# Altium footprint library ACB_PcbLib.PcbLib: 40 footprints (part 2 of 3)
Each footprint in its own frame and in the unit in brackets; x right, y up, seen from the top. Pads: shape width x height; smd on the part's side, far side on the other; paste and mask are expansions set on the pad; w line width, h text height; cw(c..) or ccw(c..) is an arc to the next point about the centre after c.
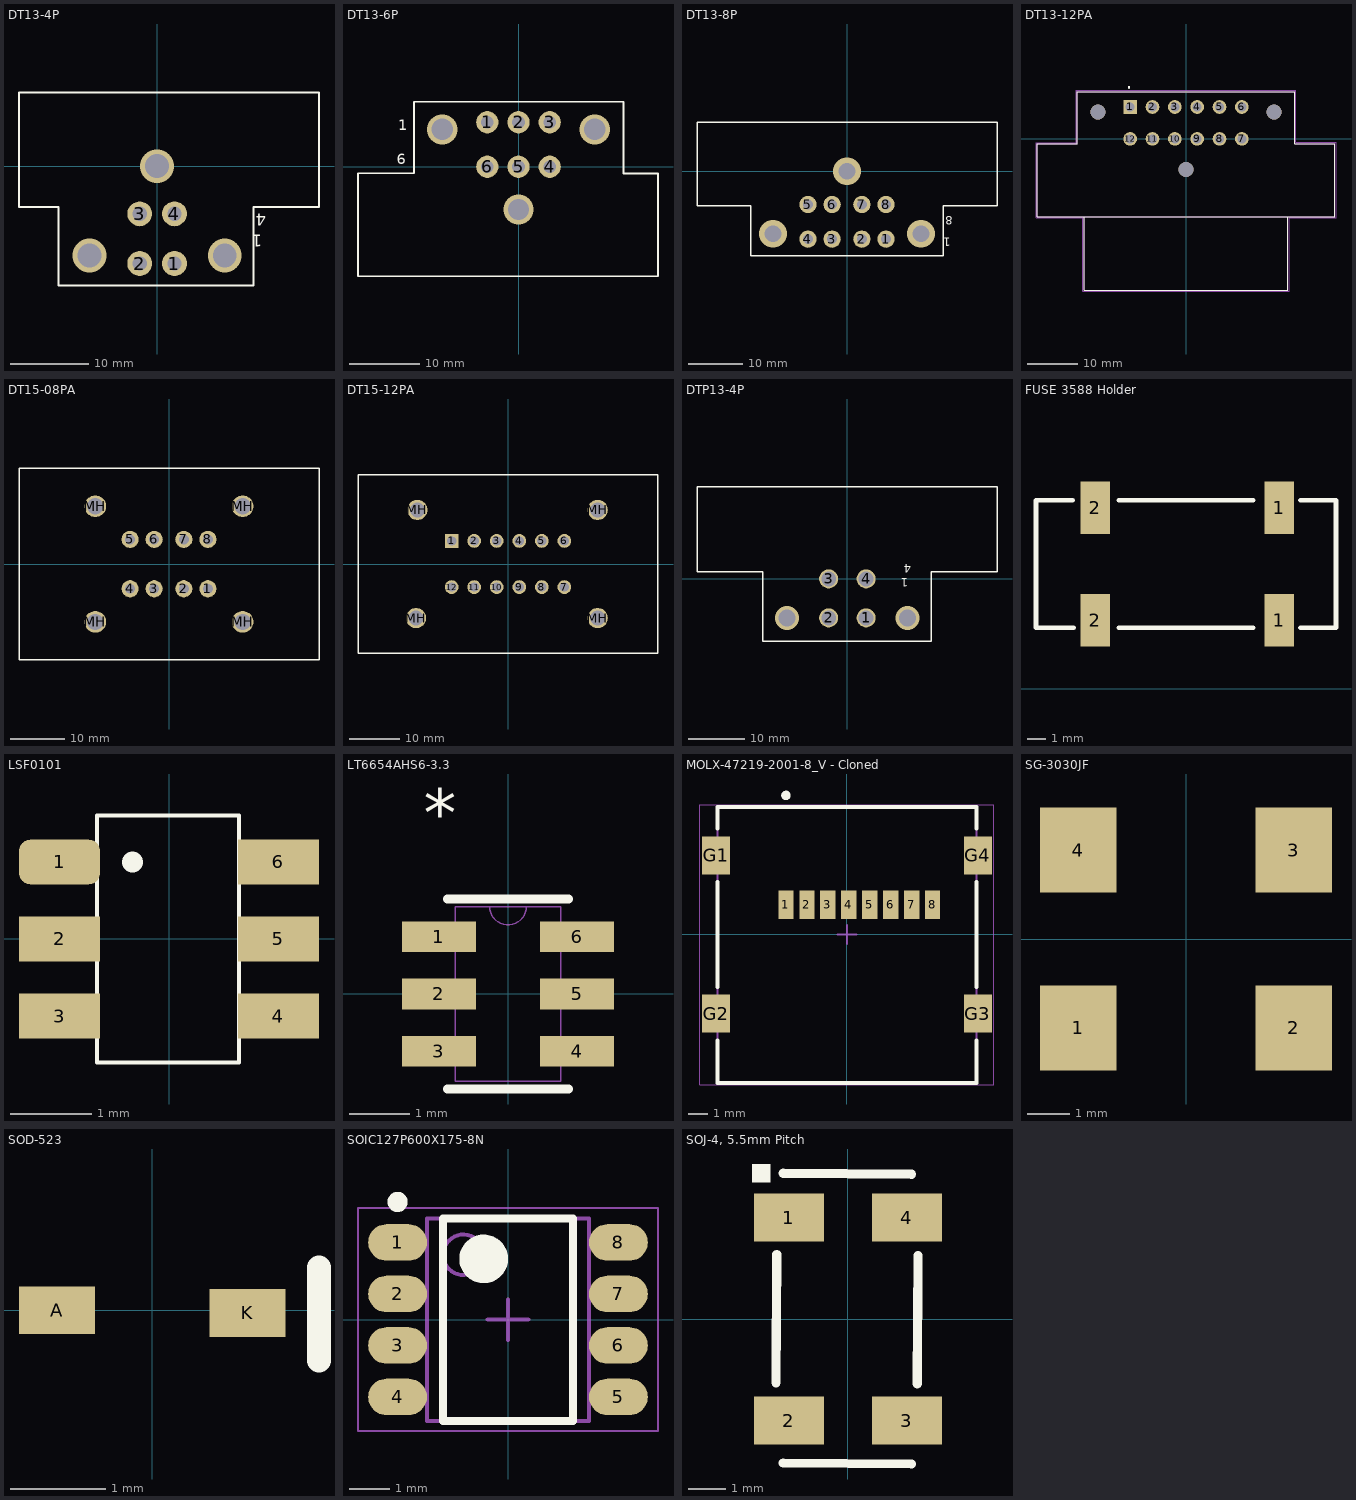
[diagram p1: the footprints below, top view; thin cyan lines are the x and y axes]

## DT13-4P [mil]
pads (4):
  round 125 hole 72: 1(87.5,-490) 2(-87.5,-490) 3(-87.5,-240)
  round 125 hole 72.01: 4(87.5,-240)
via 0,0 diameter 170 hole 120
via -340.5,-450 diameter 170 hole 120
via 340.5,-450 diameter 170 hole 120
Top Overlay:
  lines w10: -500,-205 -695,-205 -695,370 815,370 815,-205 490,-205 ; -495,-205 -495,-600 485,-600 485,-205
  text "4" at 550,-240 h60
  text "1" at 530,-345 h60
3D body "DT13-4P.stp": height 1394, standoff -125, extent -700,-607.5 810,947.5

## DT13-6P [mil]
pads (6):
  round 125 hole 72: 1(-175.2,250) 2(0,250) 3(175.2,250) 4(175.2,0) 5(0,0) 6(-175.2,0)
via 0,-240.16 diameter 170 hole 120
via -428.15,209.65 diameter 170 hole 120
via 428.15,209.65 diameter 170 hole 120
Top Overlay:
  lines w10: -901.57,-615.16 783.46,-615.16 783.46,-37.4 589.57,-37.4 589.57,365.16 -586.61,365.16 -586.61,-36.42 -901.57,-36.42 -901.57,-615.16
  text "1" at -674.21,203.74 h60
  text "6" at -685.04,12.8 h60
3D body "c-dt13-6p-99-3d.stp": height 1402.66, standoff -116.34, extent -903.52,-1182.95 781.48,372.05

## DT13-8P [mil]
pads (8):
  round 125 hole 72: 1(282.5,-490) 2(107.5,-490) 3(-107.5,-490) 4(-282.5,-490) 5(-282.5,-240) 7(107.5,-240)
  round 125 hole 72.01: 6(-107.5,-240) 8(282.5,-240)
via 535,-450 diameter 200 hole 120
via -535,-450 diameter 200 hole 120
via 0,0 diameter 200 hole 120
Top Overlay:
  lines w10: -1085,-250 -695,-250 -695,-610 695,-610 695,-250 1085,-250 1085,355 -1085,355 -1085,-250
  text "1" at 750,-480 h60
  text "8" at 765,-325 h60
3D body "c-dt13-08pc-99-3d.stp": height 1394, standoff -125, extent -1090,-602.5 1080,942.5

## DT13-12PA [mm]
pads (15):
  rect 2.715x2.715 hole 1.81: 1(-11.115,6.35)
  round 2.715 hole 1.81: 2(-6.67,6.35) 3(-2.225,6.35) 4(2.225,6.35) 5(6.67,6.35) 6(11.115,6.35) 7(11.115,0) 8(6.67,0) 9(2.225,0) 10(-2.225,0) 11(-6.67,0) 12(-11.115,0)
  round 2.99 hole 2.99 unplated: None(-17.54,5.34) None(0,-6.1) None(17.54,5.34)
Top Overlay:
  circle w0.2: c-11.35,10.25 r0.158
  lines w0.127: -20.28,-15.49 -20.28,-30.1 20.28,-30.1 20.28,-15.49 ; -20.28,-15.49 -29.605,-15.49 -29.605,-1 -21.605,-1 -21.605,9.4 21.605,9.4 21.605,-1 29.605,-1 29.605,-15.49 20.28,-15.49 ; -20.28,-15.49 20.28,-15.49
Mechanical 4:
  lines w0.127: -29.605,-15.49 -29.605,-1 ; -29.605,-15.49 -20.28,-15.49 ; -29.605,-15.49 -29.605,-1 ; -29.605,-15.49 -20.28,-15.49 ; -29.605,-1 -21.605,-1 ; -29.605,-1 -21.605,-1 ; -21.605,-1 -21.605,9.4 ; -21.605,-1 -21.605,9.4 ; -21.605,9.4 21.605,9.4 ; -21.605,9.4 21.605,9.4 ; -20.28,-30.1 20.28,-30.1 ; -20.28,-30.1 -20.28,-15.49 ; -20.28,-30.1 20.28,-30.1 ; -20.28,-30.1 -20.28,-15.49 ; -20.28,-15.49 20.28,-15.49 ; -20.28,-15.49 20.28,-15.49 ; 20.28,-30.1 20.28,-15.49 ; 20.28,-30.1 20.28,-15.49 ; 20.28,-15.49 29.605,-15.49 ; 20.28,-15.49 29.605,-15.49 ; 21.605,-1 29.605,-1 ; 21.605,-1 21.605,9.4 ; 21.605,-1 29.605,-1 ; 21.605,-1 21.605,9.4 ; 29.605,-15.49 29.605,-1 ; 29.605,-15.49 29.605,-1
Mechanical 16:
  lines w0.05: -29.855,-15.74 -29.855,-0.75 -21.85,-0.75 -21.85,9.65 21.85,9.65 21.85,-0.7 29.855,-0.7 29.855,-15.74 20.53,-15.74 20.53,-30.35 -20.53,-30.35 -20.53,-15.74 -29.855,-15.74

## DT15-08PA [mil]
pads (12):
  round 125 hole 72: 1(282.5,-179.5) 2(107.5,-179.5) 3(-107.5,-179.5) 4(-282.5,-179.5) 5(-282.5,179.5) 7(107.5,179.5)
  round 125 hole 72.01: 6(-107.5,179.5) 8(282.5,179.5)
  round 157.48 hole 118.11: MH(-535,-420) MH(-535,420) MH(535,-420) MH(535,420)
Top Overlay:
  lines w10: -1089.57,-695.87 -1089.57,696.85 1087.6,696.85 1089.57,694.88 1089.57,-693.9 1087.6,-695.87 -1089.57,-695.87
  text "." at -1061.02,747.05 h60
3D body "c-dt15-08pa-99-3d.stp": height 1181.1, standoff -125.9, extent -1084.99,-694.98 1085.01,693.02

## DT15-12PA [mm]
pads (16):
  rect 2.715x2.715 hole 1.81: 1(-11.115,4.559)
  round 2.715 hole 1.81: 2(-6.67,4.559) 3(-2.225,4.559) 4(2.225,4.559) 5(6.67,4.559) 6(11.115,4.559) 7(11.115,-4.559) 8(6.67,-4.559) 9(2.225,-4.559) 10(-2.225,-4.559) 11(-6.67,-4.559) 12(-11.115,-4.559)
  round 4 hole 2.99: MH(-18.15,-10.668) MH(-17.875,10.668) MH(17.7,-10.668) MH(17.7,10.668)
Top Overlay:
  lines w0.254: -29.604,-17.628 -29.604,17.628 29.604,17.628 29.604,-17.628 -29.604,-17.628
3D body "c-dt15-12pa-b016-99-3d.stp": height 34.8, standoff -3.12, extent -29.629,-17.527 29.579,17.728

## DTP13-4P [mil]
pads (4):
  round 134 hole 104: 1(132,-275) 2(-132,-275) 3(-132,0) 4(132,0)
via -425,-275 diameter 170 hole 120
via 425,-275 diameter 170 hole 120
Top Overlay:
  lines w10: -1060,50 -595,50 -595,-440 590,-440 590,50 1055,50 1055,650 -1060,650 -1060,50
  text "4" at 450,105 h60
  text "1" at 430,5 h60
3D body "DTP13-4P.stp": height 1418.5, standoff -170.08, extent -1070,-440 1060,1397

## FUSE 3588 Holder [mm]
pads (4):
  rect 1.59x2.84 smd: 1(14.916,3.697) 1(14.916,9.737) 2(5.016,3.697) 2(5.016,9.737)
Top Overlay:
  lines w0.254: 3.807,10.146 1.838,10.146 1.838,3.288 3.87,3.288 ; 6.283,3.288 13.522,3.288 ; 6.283,10.146 13.522,10.146 ; 16.062,3.288 17.967,3.288 17.967,10.146 16.062,10.146
3D body "keystone-PN3588.STEP": height 8.08, standoff 0.03, extent 1.997,2.405 17.999,11.041

## LSF0101 [mm]
pads (6):
  rrect50% 1x0.55 smd mask+0.07: 1(-1.35,0.95)
  rect 1x0.55 smd mask+0.07: 2(-1.35,0) 3(-1.35,-0.95) 4(1.35,-0.95) 5(1.35,0) 6(1.35,0.95)
Top Overlay:
  lines w0.05: -0.887,-1.525 -0.45,-1.525 0.425,-1.525 0.862,-1.525 0.862,1.525 0.425,1.525 -0.45,1.525 -0.887,1.525 -0.887,0.925 -0.887,-1.525
  lines w0.254: -0.45,0.948 ccw(c-0.5,0.955) -0.45,0.95

## LT6654AHS6-3.3 [mil]
pads (6):
  rect 48x20 smd: 1(-45,37.4) 2(-45,0) 3(-45,-37.4) 4(45,-37.4) 5(45,0) 6(45,37.4)
Top Overlay:
  lines w6: -39.5,-62 39.5,-62 ; -39.5,62 39.5,62
  text "*" at -55,102.4 h31.25
Mechanical 1:
  lines w1: -12,57 ccw(c0,57) 12,57 ; -55,-46.4 -34.5,-46.4 -34.5,-28.4 -55,-28.4 -55,-46.4 ; -55,-9 -34.5,-9 -34.5,9 -55,9 -55,-9 ; -55,28.4 -34.5,28.4 -34.5,46.4 -55,46.4 -55,28.4 ; -34.5,-57 -34.5,57 34.5,57 34.5,-57 -34.5,-57 ; 34.5,-46.4 55,-46.4 55,-28.4 34.5,-28.4 34.5,-46.4 ; 34.5,-9 55,-9 55,9 34.5,9 34.5,-9 ; 34.5,28.4 55,28.4 55,46.4 34.5,46.4 34.5,28.4
  text "*" at -19.5,54 h31.25

## MOLX-47219-2001-8_V - Cloned [mm] "CONN, 8-Leads, Body 14.5x13.6mm, Pitch 1.1mm"
height 1.9
pads (12):
  rect 0.8x1.5 smd: 1(-3.205,1.55) 2(-2.105,1.55) 3(-1.005,1.55) 4(0.095,1.55) 5(1.195,1.55) 6(2.295,1.55) 7(3.395,1.55) 8(4.495,1.55)
  rect 1.45x2 smd: G1(-6.875,4.15) G2(-6.875,-4.15) G3(6.875,-4.15) G4(6.875,4.15)
Top Overlay:
  circle w0.25: c-3.205,7.3 r0.125
  lines w0.2: -6.8,-5.55 -6.8,-7.8 6.8,-7.8 6.8,-5.55 ; -6.8,-2.75 -6.8,2.75 ; -6.8,5.55 -6.8,6.7 6.8,6.7 6.8,5.55 ; 6.8,-2.75 6.8,2.75
Mechanical 13:
  lines w0.1: -6.8,-7.8 -6.8,6.7 6.8,6.7 6.8,-7.8 -6.8,-7.8
Mechanical 15:
  lines w0.05: -7.725,-7.9 -7.725,6.8 7.7,6.8 7.7,-7.9 -7.725,-7.9
  lines w0.1: -0.5,0 0.5,0 ; 0,-0.5 0,0.5
3D body "472192001.stp": height 1.91, standoff 0.02, extent -7.3,-7.793 7.3,6.707

## Relay DPDT [mm]

## SG-3030JF [mm]
pads (4):
  rect 1.8x2 smd: 1(-2.54,-2.1) 2(2.54,-2.1) 3(2.54,2.1) 4(-2.54,2.1)
3D body: height 1.5, standoff 0, extent -3.6,-2.3 3.6,2.3

## SOD-523 [mm]
pads (2):
  rect 0.8x0.5 smd: A(-1,0) K(1,-0.027)
Top Overlay:
  lines w0.254: 1.75,-0.525 1.75,0.45
3D body: height 0.7, standoff 0, extent -1.15,-0.45 1.15,0.45

## SOIC127P600X175-8N [mm] "SOIC, 8-Leads, Body 4.90x3.90mm, Pitch 1.27mm, IPC Medium Density"
height 1.75
pads (8):
  oval 1.45x0.9 smd: 1(-2.725,1.905) 2(-2.725,0.635) 3(-2.725,-0.635) 4(-2.725,-1.905) 5(2.725,-1.905) 6(2.725,-0.635) 7(2.725,0.635) 8(2.725,1.905)
Top Overlay:
  circle w0.6: c-0.6,1.5 r0.3
  circle w0.25: c-2.725,2.905 r0.125
  lines w0.2: -1.6,-2.5 1.6,-2.5 1.6,2.5 -1.6,2.5 -1.6,-2.5
Mechanical 13:
  circle w0.1: c-1.1,1.6 r0.5
  lines w0.1: -2,-2.5 2,-2.5 2,2.5 -2,2.5 -2,-2.5
Mechanical 15:
  lines w0.05: -3.7,-2.75 3.7,-2.75 3.7,2.75 -3.7,2.75 -3.7,-2.75
  lines w0.1: -0.5,0 0.5,0 ; 0,-0.5 0,0.5
3D body: height 1.75, standoff 0.1, extent -2,-2.5 2,2.5

## SOJ-4, 5.5mm Pitch [mm]
pads (4):
  rect 1.9x1.3 smd: 1(-1.6,2.75) 2(-1.6,-2.75) 3(1.6,-2.75) 4(1.6,2.75)
Top Overlay:
  region: -2.6,4.2 -2.6,3.7 -2.1,3.7 -2.1,4.2
  lines w0.25: -1.95,-1.725 -1.925,1.75 ; -1.75,-3.9 1.725,-3.925 ; -1.75,3.95 1.725,3.925 ; 1.875,-1.75 1.9,1.725
3D body: height 2.5, standoff 0, extent -1.9,-4 1.9,4